# Altium schematic symbol library Fuses.SchLib: 1 symbol
Pins are listed as number, name and electrical type; pins without a type are passive.

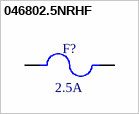
[diagram p0: symbol 046802.5NRHF]

## 046802.5NRHF
designator F?, comment value 2.5A  (hidden comment: Littlefuse 046802.5NRHF)
2.5 A 63 V AC 63 V DC Fuse Board Mount (Cartridge Style Excluded) Surface Mount 1206 (3216 Metric); MF: Littelfuse Inc.; SnapEDA_Link: https://www.snapeda.com/parts/046802.5NRHF/Littelfuse/view-part/?ref=snap; Package: 1206 Littelfuse Inc.; MP: 046802.5NRHF; Check_prices: https://www.snapeda.com/parts/046802.5NRHF/Littelfuse/view-part/?ref=eda
footprint FUSSC318X152X76-2N
pins: 1, 2